# Altium footprint library PCB_V2.PcbLib: 86 footprints (part 2 of 6)
Each footprint in its own frame and in the unit in brackets; x right, y up, seen from the top. Pads: shape width x height; smd on the part's side, far side on the other; paste and mask are expansions set on the pad; w line width, h text height; cw(c..) or ccw(c..) is an arc to the next point about the centre after c.
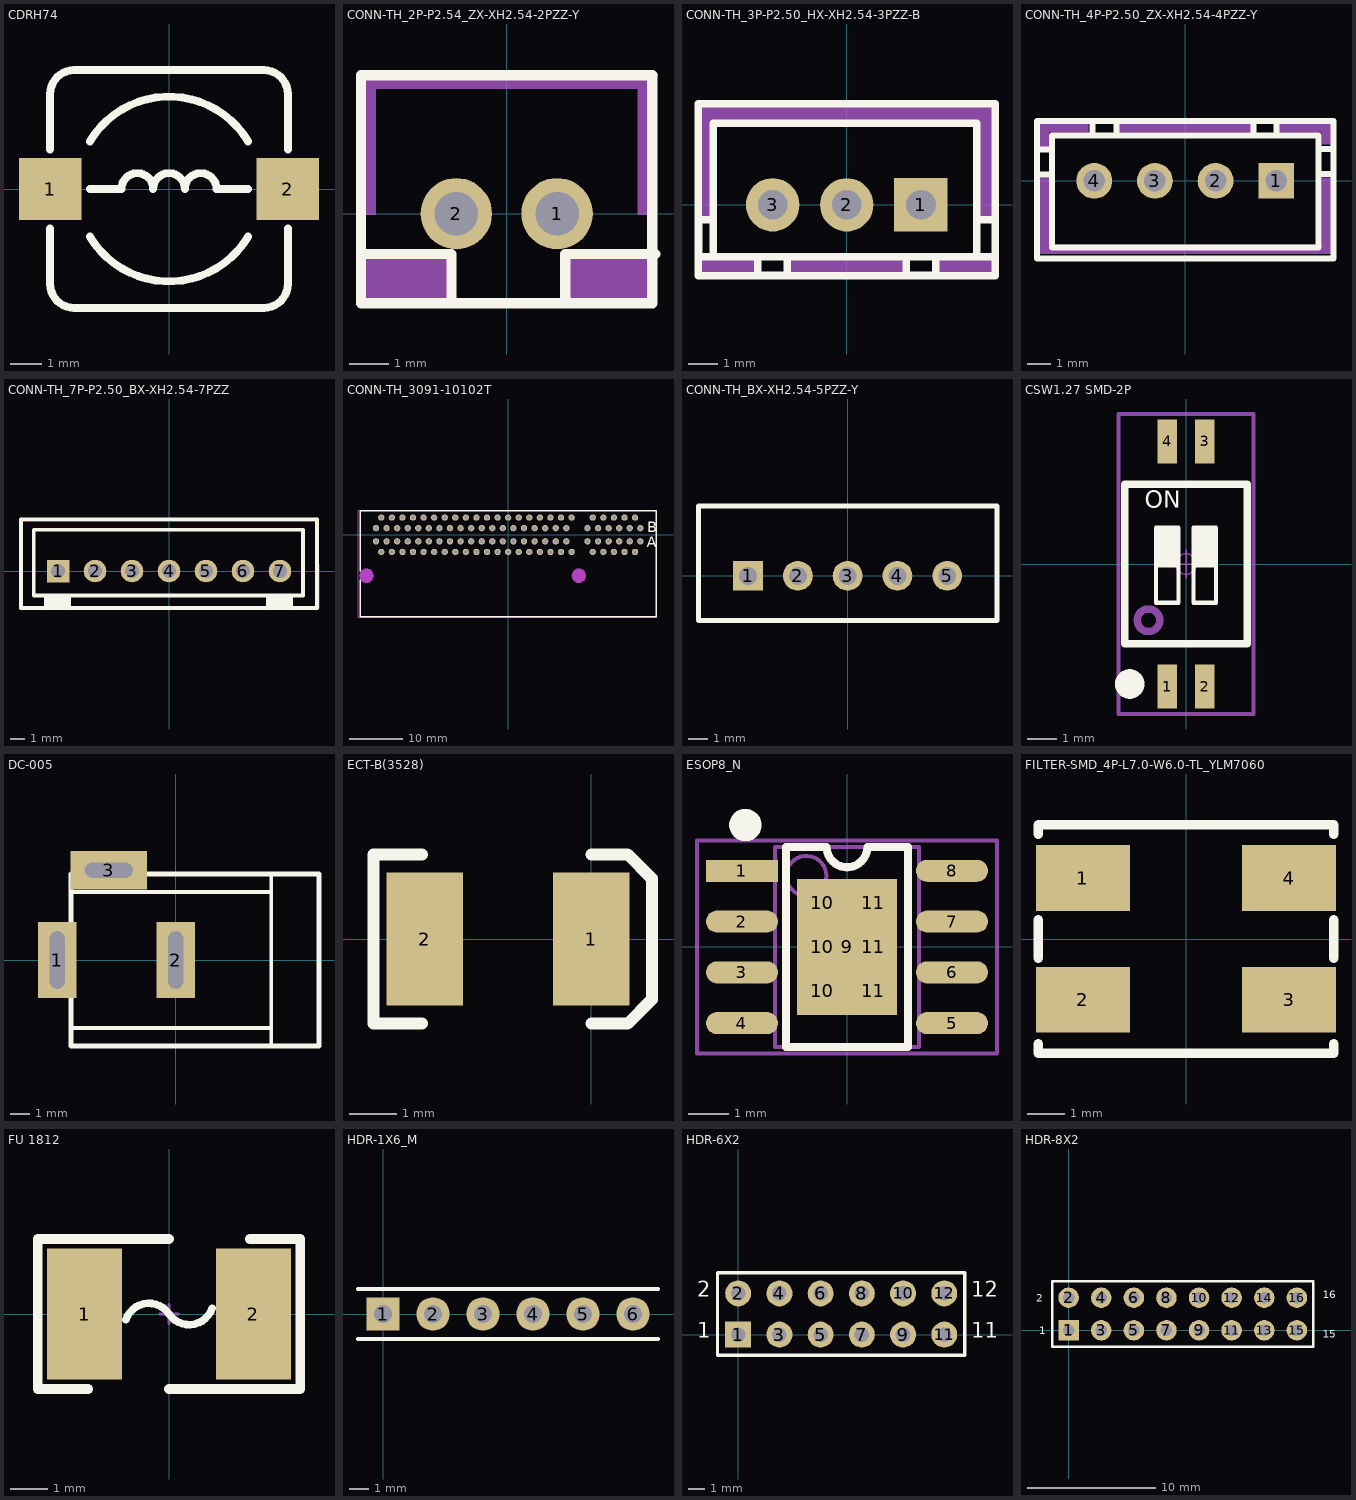
[diagram p1: the footprints below, top view; thin cyan lines are the x and y axes]

## CDRH74 [mm] "7.3*7"
pads (2):
  rect 2x2 smd: 1(-3.81,0) 2(3.81,0)
Top Overlay:
  lines w0.254: -3.81,-1.27 -3.81,-3.048 ccw(c-3.048,-3.048) -3.048,-3.81 3.048,-3.81 ccw(c3.048,-3.048) 3.81,-3.048 3.81,-1.27 ; -3.81,1.27 -3.81,3.048 cw(c-3.048,3.048) -3.048,3.81 3.048,3.81 cw(c3.048,3.048) 3.81,3.048 3.81,1.27 ; -2.54,-1.524 ccw(c0,0) 2.54,-1.524 ; -2.54,0 -1.524,0 cw(c-1.016,0) -0.508,0 cw(c0,0) 0.508,0 cw(c1.016,0) 1.524,0 2.54,0 ; -2.54,1.524 cw(c0,0) 2.54,1.524
3D body: height 4.5, standoff 0, extent -3.65,-3.65 3.65,3.65

## CONN-TH_2P-P2.54_ZX-XH2.54-2PZZ-Y [mm]
pads (2):
  round 1.8 hole 1.1 paste+0 mask+0.05: 1(1.27,0) 2(-1.27,0)
Top Overlay:
  lines w0.254: -3.67,-1.014 -1.397,-1.014 -1.397,-2.26 ; 1.477,-2.26 1.477,-1.014 3.75,-1.014 ; -3.67,-2.26 -3.67,3.49 3.67,3.49 3.67,-2.26 -3.67,-2.26
Mechanical 2:
  region: -3.683,-1.042 -1.397,-1.042 -1.397,-2.312 -3.683,-2.312
  region: 1.464,-1.042 3.75,-1.042 3.75,-2.312 1.464,-2.312
  region: -3.683,-0.026 -3.683,3.53 3.683,3.53 3.683,-0.026 3.302,-0.026 3.302,3.149 -3.302,3.149 -3.302,-0.026
Mechanical 6:
  lines w0.051: -3.75,-2.26 -3.75,3.49 3.75,3.49 3.75,-2.26 -3.75,-2.26
Mechanical 8:
  region: 3.815,3.49 3.796,3.444 3.75,3.425 3.704,3.444 3.685,3.49 3.704,3.536 3.75,3.555 3.796,3.536
Mechanical 9:
  region: -1.67,0.4 -0.87,0.4 -0.87,-0.4 -1.67,-0.4
  region: 0.87,0.4 1.67,0.4 1.67,-0.4 0.87,-0.4

## CONN-TH_3P-P2.50_HX-XH2.54-3PZZ-B [mm]
pads (3):
  rect 1.8x1.8 hole 1 paste+0 mask+0.05: 1(2.5,0)
  round 1.8 hole 1 paste+0 mask+0.05: 2(0,0) 3(-2.5,0)
Top Overlay:
  lines w0.254: -4.5,-1.75 -4.5,-0.5 -5,-0.5 -5,-1.75 -4.5,-1.75 ; -4.5,-1.75 4.375,-1.75 ; -4.5,-1.75 -4.5,2.75 4.375,2.75 4.375,-1.75 ; 4.375,-1.75 5,-1.75 5,-0.5 4.375,-0.5 4.375,-1.75 ; -5,-2.4 -5,3.4 5,3.4 5,-2.4 -5,-2.4 ; -3,-2.375 -2,-2.375 -2,-1.75 -3,-1.75 -3,-2.375 ; 2,-2.375 3,-2.375 3,-1.75 2,-1.75 2,-2.375
Mechanical 6:
  region: -5.05,-1.715 -5.05,-2.24 -4.925,-2.365 -3.075,-2.365 -3.05,-2.34 -3.05,-1.715
  region: -2,-2.4 2,-2.4 2,-1.75 -2,-1.75
  region: 3,-1.75 3,-2.275 3.125,-2.4 4.975,-2.4 5,-2.375 5,-1.75
  region: 4.375,-0.5 5,-0.5 5,3.4 -5,3.4 -5,-0.5 -4.5,-0.5 -4.5,2.75 4.375,2.75
Mechanical 7:
  lines w0.051: -5,-2.4 -5,3.4 5,3.4 5,-2.4 -5,-2.4
Mechanical 8:
  region: 5.065,3.4 5.046,3.354 5,3.335 4.954,3.354 4.935,3.4 4.954,3.446 5,3.465 5.046,3.446
Mechanical 9:
  region: -2.8,0.3 -2.2,0.3 -2.2,-0.3 -2.8,-0.3
  region: -0.3,0.3 0.3,0.3 0.3,-0.3 -0.3,-0.3
  region: 2.2,0.3 2.8,0.3 2.8,-0.3 2.2,-0.3

## CONN-TH_4P-P2.50_ZX-XH2.54-4PZZ-Y [mm]
pads (4):
  rect 1.5x1.5 hole 0.9: 1(3.81,0)
  round 1.5 hole 0.9: 2(1.27,0) 3(-1.27,0) 4(-3.81,0)
Top Overlay:
  lines w0.254: -6.21,0.26 -5.588,0.26 ; -6.21,1.313 -5.588,1.313 ; -3.893,1.905 -3.893,2.5 ; -2.877,1.905 -2.877,2.5 ; 2.851,1.905 2.851,2.5 ; 3.816,1.905 3.816,2.5 ; 5.588,0.284 6.21,0.284 ; 5.588,1.338 6.21,1.338 ; -6.21,-3.25 6.21,-3.25 6.21,2.5 -6.21,2.5 -6.21,-3.25 ; -5.588,-2.794 5.588,-2.794 5.588,1.905 -5.588,1.905 -5.588,-2.794
Mechanical 6:
  region: 2.794,2.413 2.794,2.032 -2.794,2.032 -2.794,2.413
  region: 3.937,2.413 6.096,2.413 6.096,1.524 5.715,1.524 5.715,2.032 3.937,2.032
  region: 5.715,0.127 6.096,0.127 6.096,-3.048 -6.096,-3.048 -6.096,0.127 -5.715,0.127 -5.715,-2.667 5.715,-2.667
  region: -4.064,2.413 -6.096,2.413 -6.096,1.397 -5.715,1.397 -5.715,2.032 -4.064,2.032
Mechanical 15:
  region: 6.315,2.5 6.296,2.546 6.25,2.565 6.204,2.546 6.185,2.5 6.204,2.454 6.25,2.435 6.296,2.454
  region: 3.49,0.32 4.13,0.32 4.13,-0.32 3.49,-0.32
  region: 0.95,0.32 1.59,0.32 1.59,-0.32 0.95,-0.32
  region: -1.59,0.32 -0.95,0.32 -0.95,-0.32 -1.59,-0.32
  region: -4.13,0.32 -3.49,0.32 -3.49,-0.32 -4.13,-0.32
  lines w0.051: -6.25,-3.25 -6.25,2.5 6.25,2.5 6.25,-3.25 -6.25,-3.25

## CONN-TH_7P-P2.50_BX-XH2.54-7PZZ [mil]
pads (7):
  rect 60x60 hole 37.4: 1(-295.27,0)
  round 60 hole 37.4: 2(-196.85,0) 3(-98.42,0) 4(0,0) 5(98.42,0) 6(196.85,0) 7(295.27,0)
Top Overlay:
  region: -331.57,-60 -261.57,-60 -261.57,-100 -331.57,-100
  region: 258.98,-60 328.98,-60 328.98,-100 258.98,-100
  lines w10: -393.7,-98.42 393.7,-98.42 393.7,137.79 -393.7,137.79 -393.7,-98.42 ; -360,-65 356.58,-65 356.58,110 -360,110 -360,-65
Mechanical 6:
  region: -330.71,-103.42 -393.7,-103.84 -397.53,-102.25 -399.11,-98.42 -398.7,-98.42 -399.11,135.83 -397.53,139.65 -393.7,141.24 -393.7,140.83 393.7,141.24 397.53,139.65 399.11,135.83 398.7,135.83 399.11,-98.42 397.53,-102.25 393.7,-103.84 393.7,-103.42 328.74,-103.84 324.91,-102.25 323.33,-98.42 324.91,-94.6 328.74,-93.01 328.74,-93.42 388.7,-93.42 388.7,130.83 -388.7,130.83 -388.7,-93.42 -330.71,-93.01 -326.88,-94.6 -325.3,-98.42 -326.88,-102.25 -330.71,-103.84
  region: -261.81,-93.42 259.84,-93.01 263.67,-94.6 265.25,-98.42 263.67,-102.25 259.84,-103.84 259.84,-103.42 -261.81,-103.84 -265.64,-102.25 -267.22,-98.42 -265.64,-94.6 -261.81,-93.01
Mechanical 15:
  region: -391.17,-96.45 -391.89,-94.72 -393.7,-93.97 -395.51,-94.72 -396.22,-96.45 -396.23,-96.46 -395.51,-98.2 -393.7,-98.94 -391.89,-98.2
  region: 282.68,12.6 307.87,12.6 307.87,-12.6 282.68,-12.6
  region: 184.26,12.6 209.45,12.6 209.45,-12.6 184.26,-12.6
  region: 85.83,12.6 111.02,12.6 111.02,-12.6 85.83,-12.6
  region: -12.59,12.6 12.6,12.6 12.6,-12.6 -12.59,-12.6
  region: -111.02,12.6 -85.83,12.6 -85.83,-12.6 -111.02,-12.6
  region: -209.44,12.6 -184.25,12.6 -184.25,-12.6 -209.44,-12.6
  region: -307.87,12.6 -282.68,12.6 -282.68,-12.6 -307.87,-12.6
  lines w2: -393.7,-96.46 -393.7,135.83 393.7,135.83 393.7,-96.46 -393.7,-96.46

## CONN-TH_3091-10102T [mm]
pads (98):
  round 1.2 hole 0.8: A1(25,-1.25) A2(24,-3.25) A3(23,-1.25) A4(22,-3.25) A5(21,-1.25) A6(20,-3.25) A7(19,-1.25) A8(18,-3.25) A9(17,-1.25) A10(16,-3.25) A11(15,-1.25) A12(12,-3.25) A13(11,-1.25) A14(10,-3.25) A15(9,-1.25) A16(8,-3.25) A17(7,-1.25) A18(6,-3.25) A19(5,-1.25) A20(4,-3.25) A21(3,-1.25) A22(2,-3.25) A23(1,-1.25) A24(0,-3.25) A25(-1,-1.25) A26(-2,-3.25) A27(-3,-1.25) A28(-4,-3.25) A29(-5,-1.25) A30(-6,-3.25) A31(-7,-1.25) A32(-8,-3.25) A33(-9,-1.25) A34(-10,-3.25) A35(-11,-1.25) A36(-12,-3.25) A37(-13,-1.25) A38(-14,-3.25) A39(-15,-1.25) A40(-16,-3.25) A41(-17,-1.25) A42(-18,-3.25) A43(-19,-1.25) A44(-20,-3.25) A45(-21,-1.25) A46(-22,-3.25) A47(-23,-1.25) A48(-24,-3.25) A49(-25,-1.25) B1(25,1.25) B2(24,3.25) B3(23,1.25) B4(22,3.25) B5(21,1.25) B6(20,3.25) B7(19,1.25) B9(17,1.25) B11(15,1.25) B13(11,1.25) B15(9,1.25) B17(7,1.25) B19(5,1.25) B21(3,1.25) B23(1,1.25) B25(-1,1.25) B27(-3,1.25) B29(-5,1.25) B31(-7,1.25) B33(-9,1.25) B35(-11,1.25) B37(-13,1.25) B39(-15,1.25) B41(-17,1.25) B47(-23,1.25)
  round 1.2 hole 0.8 copper offset 0,0: B8(18,3.25) B10(16,3.25) B12(12,3.25) B14(10,3.25) B16(8,3.25) B18(6,3.25) B20(4,3.25) B22(2,3.25) B24(0,3.25) B26(-2,3.25) B28(-4,3.25) B30(-6,3.25) B32(-8,3.25) B34(-10,3.25) B36(-12,3.25) B38(-14,3.25) B40(-16,3.25) B42(-18,3.25) B43(-19,1.25) B44(-20,3.25) B45(-21,1.25) B46(-22,3.25) B48(-24,3.25) B49(-25,1.25)
Top Overlay:
  lines w0.254: -28,-8.549 -28,-15.5 28,-15.5 28,4.5 -28,4.5 -28,-6.951
  text "A" at 26.21,-2.394 h2.03
  text "B" at 26.31,0.427 h2.03
Keep-Out Layer:
  board cut-out: 14.611,-7.75 14.568,-7.424 14.442,-7.12 14.242,-6.858 13.981,-6.658 13.676,-6.532 13.35,-6.489 13.024,-6.532 12.72,-6.658 12.459,-6.858 12.258,-7.12 12.132,-7.424 12.089,-7.75 12.132,-8.076 12.258,-8.38 12.459,-8.641 12.72,-8.842 13.024,-8.968 13.35,-9.011 13.676,-8.968 13.981,-8.842 14.242,-8.641 14.442,-8.38 14.568,-8.076 14.611,-7.75
  board cut-out: -25.539,-7.75 -25.582,-7.424 -25.708,-7.12 -25.908,-6.858 -26.17,-6.658 -26.474,-6.532 -26.8,-6.489 -27.126,-6.532 -27.43,-6.658 -27.691,-6.858 -27.892,-7.12 -28.018,-7.424 -28.061,-7.75 -28.018,-8.076 -27.892,-8.38 -27.691,-8.641 -27.43,-8.842 -27.126,-8.968 -26.8,-9.011 -26.474,-8.968 -26.17,-8.842 -25.908,-8.641 -25.708,-8.38 -25.582,-8.076 -25.539,-7.75
Keep-Out Layer:
  circle w0.025: c13.35,-7.75 r1.25
  circle w0.254: c13.35,-7.75 r1.25
  circle w0.025: c-26.8,-7.75 r1.25
  circle w0.254: c-26.8,-7.75 r1.25
Mechanical 1:
  circle w0.025: c13.35,-7.75 r1.25
  circle w0.025: c-26.8,-7.75 r1.25
Mechanical 15:
  drawing of 105 lines, arcs and shapes, not listed

## CONN-TH_BX-XH2.54-5PZZ-Y [mm]
pads (5):
  rect 1.5x1.5 hole 0.9 copper offset 0,0 paste+0 mask+0.05: 1(-5,0)
  round 1.5 hole 0.9 paste+0 mask+0.05: 2(-2.5,0) 4(2.5,0)
  round 1.5 hole 0.9 copper offset 0,0 paste+0 mask+0.05: 3(0,0) 5(5,0)
Top Overlay:
  lines w0.254: -7.5,-2.25 -7.5,3.5 5,3.5 7.5,3.5 7.5,-2.25 ; -7.5,-2.25 5,-2.25 ; 4.844,-2.25 7.5,-2.25
Mechanical 15:
  region: -7.435,-2.25 -7.454,-2.204 -7.5,-2.185 -7.546,-2.204 -7.565,-2.25 -7.546,-2.296 -7.5,-2.315 -7.454,-2.296 -7.435,-2.25

## CSW1.27 SMD-2P [mm] "长：4.14mm，"
pads (4):
  rect 0.65x1.5 smd: 1(-0.635,-4.15) 2(0.635,-4.15) 3(0.635,4.15) 4(-0.635,4.15)
Top Overlay:
  circle w0.5: c-1.905,-4.064 r0.25
  region: -0.254,1.225 -1.016,1.225 -1.016,-0.045 -0.254,-0.045
  region: 1.016,1.225 0.254,1.225 0.254,-0.045 1.016,-0.045
  lines w0.15: -1.016,-0.045 -0.254,-0.045 ; 0.254,-0.045 1.016,-0.045 ; -1.016,-1.315 -0.254,-1.315 -0.254,1.225 -1.016,1.225 -1.016,-1.315 ; 0.254,-1.315 1.016,-1.315 1.016,1.225 0.254,1.225 0.254,-1.315
  lines w0.254: -2.07,-2.7 -2.07,2.7 2.07,2.7 2.07,-2.7 -2.07,-2.7
  text "ON" at -1.397,1.696 h1
Mechanical 13:
  circle w0.254: c-1.27,-1.905 r0.381
  lines w0.15: -2.032,-2.7 2.032,-2.7 2.032,2.7 -2.032,2.7 -2.032,-2.7
Mechanical 15:
  circle w0.05: c0,0 r0.35
  lines w0.05: -0.5,0 0.5,0 ; 0,-0.5 0,0.5
  lines w0.15: -2.286,-5.08 2.159,-5.08 2.286,-5.08 2.286,5.08 -2.286,5.08 -2.286,-5.08
3D body: height 2.35, standoff 0, extent -2.07,-4.35 2.07,4.35

## DC-005 [mm] "5.5*2.1mm，DC30V"
pads (3):
  rect 2x4 hole 0.8 slot 3 at 90 deg: 1(-6.2,0) 2(0,0)
  rect 4x2 hole 0.8 slot 2.5 at 0 deg: 3(-3.5,4.7)
Top Overlay:
  lines w0.2: -5.484,-3.556 5,-3.556 ; -5.484,3.556 5,3.556 ; 5,-4.5 5,4.5
  lines w0.254: -5.484,-4.5 -5.484,4.5 7.5,4.5 7.5,-4.5 -5.484,-4.5
3D body: height 11.2, standoff -3.8, extent -6.55,-4.5 7.5,4.8

## ECT-B(3528) [mm]
height 2.54
pads (2):
  rect 1.6x2.8 smd: 1(0,0) 2(-3.5,0)
Top Overlay:
  lines w0.254: -3.556,-1.778 -4.572,-1.778 -4.572,1.778 -3.556,1.778 ; 0,-1.778 0.762,-1.778 1.27,-1.27 1.27,1.27 0.762,1.778 0,1.778

## ESOP8_N [mm] "5*6*"
height 1.75
pads (15):
  rect 1.8x0.55 smd: 1(-2.625,1.905)
  oval 1.8x0.55 smd: 2(-2.625,0.635) 3(-2.625,-0.635) 4(-2.625,-1.905) 5(2.625,-1.905) 6(2.625,-0.635) 7(2.625,0.635) 8(2.625,1.905)
  rect 2.5x3.4 smd paste-2: 9(0,0)
  rect 0.9x0.7 on Top Paste: 10(-0.625,-1.1) 10(-0.625,0) 10(-0.625,1.1) 11(0.65,-1.1) 11(0.65,0) 11(0.65,1.1)
Top Overlay:
  circle w0.5: c-2.54,3.048 r0.155
  lines w0.2: -1.524,2.5 -1.524,-2.5 1.524,-2.5 1.524,2.5
  lines w0.203: -1.524,2.5 -0.508,2.5 ccw(c0,2.5) 0,1.992 ccw(c0,2.5) 0.508,2.5 1.524,2.5
Mechanical 13:
  circle w0.1: c-1.016,1.778 r0.5
  lines w0.1: -1.8,-2.5 -1.8,2.5 1.8,2.5 1.8,-2.5 -1.8,-2.5
Mechanical 15:
  circle w0.05: c0,0 r0.35
  lines w0.05: -0.5,0 0.5,0 ; 0,-0.5 0,0.5
  lines w0.1: -3.75,-2.667 3.75,-2.667 3.75,2.667 -3.75,2.667 -3.75,-2.667
3D body: height 1.53, standoff -0.01, extent -3.003,-2.5 3.003,2.5

## FILTER-SMD_4P-L7.0-W6.0-TL_YLM7060 [mm] "17*1"
pads (4):
  rect 2.5x1.75 smd: 1(-2.75,1.625) 2(-2.75,-1.625) 3(2.75,-1.625) 4(2.75,1.625)
Top Overlay:
  lines w0.254: -3.937,-2.794 -3.937,-3.048 3.937,-3.048 3.937,-2.794 ; -3.937,-0.508 -3.937,0.508 ; -3.937,2.794 -3.937,3.048 3.937,3.048 3.937,2.794 ; 3.937,-0.508 3.937,0.508

## FU 1812 [mm]
pads (2):
  rect 2x3.5 smd: 1(-2.25,0) 2(2.25,0)
Top Overlay:
  lines w0.203: -1.15,-0.156 cw(c-0.537,-0.362) 0,0 ccw(c0.537,0.362) 1.15,0.156
  lines w0.254: -2.159,-2 -3.5,-2 -3.5,2 0,2 ; 0,-2 3.5,-2 3.5,2 2.159,2
Mechanical 15:
  lines w0.076: -0.254,0 0.254,0 ; 0,-0.254 0,0.254
3D body: height 0.87, standoff 0, extent -2.3,-1.61 2.3,1.61

## HDR-1X6_M [mm]
pads (6):
  rect 1.7x1.7 hole 0.9: 1(0,0)
  round 1.7 hole 0.9: 2(2.54,0) 3(5.08,0) 4(7.62,0) 5(10.16,0) 6(12.7,0)
Top Overlay:
  lines w0.2: -1.27,-1.27 13.97,-1.27 ; -1.27,1.27 13.97,1.27
3D body: height 8.5, standoff -3, extent 8.89,-1.27 11.43,1.27
3D body: height 8.5, standoff -3, extent 6.35,-1.27 8.89,1.27
3D body: height 8.5, standoff -3, extent 11.43,-1.27 13.97,1.27
3D body: height 8.5, standoff -3, extent 1.27,-1.27 3.81,1.27
3D body: height 8.5, standoff -3, extent -1.27,-1.27 1.27,1.27
3D body: height 8.5, standoff -3, extent 3.81,-1.27 6.35,1.27

## HDR-6X2 [mm]
pads (12):
  rect 1.6x1.6 hole 0.9: 1(0,0)
  round 1.6 hole 0.9: 2(0,2.54) 3(2.54,0) 4(2.54,2.54) 5(5.08,0) 6(5.08,2.54) 7(7.62,0) 8(7.62,2.54) 9(10.16,0) 10(10.16,2.54) 11(12.7,0) 12(12.7,2.54)
Top Overlay:
  lines w0.2: -1.27,-1.27 -1.27,3.81 13.97,3.81 13.97,-1.27 -1.27,-1.27
  text "2" at -2.54,2.032 h1.6
  text "1" at -2.54,-0.508 h1.6
  text "11" at 14.351,-0.508 h1.6
  text "12" at 14.351,2.032 h1.6
Bottom Overlay:
  lines w0.2: -1.27,-1.27 -1.27,3.81 13.97,3.81 13.97,-1.27 -1.27,-1.27
3D body: height 8.5, standoff -3, extent 8.89,-1.27 11.43,3.81
3D body: height 8.5, standoff -3, extent 1.27,-1.27 3.81,3.81
3D body: height 8.5, standoff -3, extent -1.27,-1.27 1.27,3.81
3D body: height 8.5, standoff -3, extent 6.35,-1.27 8.89,3.81
3D body: height 8.5, standoff -3, extent 3.81,-1.27 6.35,3.81
3D body: height 8.5, standoff -3, extent 11.43,-1.27 13.97,3.81

## HDR-8X2 [mm]
pads (16):
  rect 1.6x1.6 hole 0.9: 1(0,0)
  round 1.6 hole 0.9: 2(0,2.54) 3(2.54,0) 4(2.54,2.54) 5(5.08,0) 6(5.08,2.54) 7(7.62,0) 8(7.62,2.54) 9(10.16,0) 10(10.16,2.54) 11(12.7,0) 12(12.7,2.54) 13(15.24,0) 14(15.24,2.54) 15(17.78,0) 16(17.78,2.54)
Top Overlay:
  lines w0.2: -1.27,-1.27 -1.27,3.81 19.05,3.81 19.05,-1.27 -1.27,-1.27
  text "2" at -2.54,2.032 h1.02
  text "1" at -2.286,-0.508 h1.02
  text "16" at 19.812,2.286 h1.02
  text "15" at 19.812,-0.762 h1.02
3D body: height 8.5, standoff -3, extent 8.89,-1.27 11.43,3.81
3D body: height 8.5, standoff -3, extent 1.27,-1.27 3.81,3.81
3D body: height 8.5, standoff -3, extent -1.27,-1.27 1.27,3.81
3D body: height 8.5, standoff -3, extent 6.35,-1.27 8.89,3.81
3D body: height 8.5, standoff -3, extent 3.81,-1.27 6.35,3.81
3D body: height 8.5, standoff -3, extent 13.97,-1.27 16.51,3.81
3D body: height 8.5, standoff -3, extent 11.43,-1.27 13.97,3.81
3D body: height 8.5, standoff -3, extent 16.51,-1.27 19.05,3.81